# Altium integrated library RT9013-33GB.IntLib: 1 symbol
Pins are listed as number, name and electrical type; pins without a type are passive.

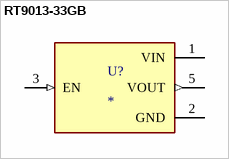
[diagram p0: symbol RT9013-33GB]

## RT9013-33GB
designator U?
Linear Voltage Regulator IC Positive Fixed 1 Output 500mA TSOT-23-5; MF: Richtek USA; MP: RT9013-33GB; SnapEDA_Link: https://www.snapeda.com/parts/RT9013-33GB/Richtek/view-part/?ref=snap; Package: SOT-23-5 Richtek; Value: *; Check_prices: https://www.snapeda.com/parts/RT9013-33GB/Richtek/view-part/?ref=eda
footprint SOT94P279X129-5N
pins: 1 VIN (power), 2 GND (power), 3 EN (in), 5 VOUT (out)